# Altium footprint library 2020-05-10_07-53-45.PcbLib: 1 footprints
Each footprint in its own frame and in the unit in brackets; x right, y up, seen from the top. Pads: shape width x height; smd on the part's side, far side on the other; paste and mask are expansions set on the pad; w line width, h text height; cw(c..) or ccw(c..) is an arc to the next point about the centre after c.
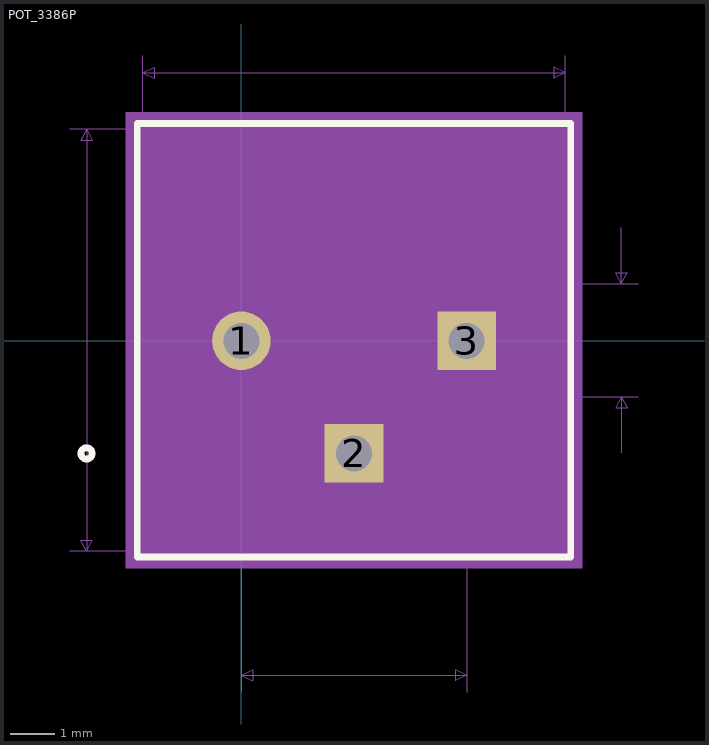
[diagram p0: the footprint, top view; thin cyan lines are the x and y axes]

## POT_3386P [mil]
pads (3):
  round 52 hole 32 mask+0: 1(0,0)
  rect 52x52 hole 32 mask+0: 2(100,-100) 3(200,0)
Top Overlay:
  circle w6: c-137.5,-100 r5
  lines w6: -92.5,-192 292.5,-192 292.5,193 -92.5,193 -92.5,-192
Mechanical 5:
  region: -102.5,203 302.5,203 302.5,-202 -102.5,-202
Mechanical 7:
  lines w1: -152.5,-187 100,-187 ; -152.5,188 100,188 ; -87.5,0.5 -87.5,253 ; 0,-312 0,0.5 ; 110,50.5 352.5,50.5 ; 200,-312 200,0.5 ; 200,-49.5 352.5,-49.5 ; 287.5,0.5 287.5,253 ; 337.5,-99.5 337.5,-49.5 ; 337.5,100.5 337.5,50.5 ; -137.5,-187 -137.5,188 ; -137.5,-187 -142.5,-177 -132.5,-177 -137.5,-187 ; -137.5,188 -142.5,178 -132.5,178 -137.5,188 ; -87.5,238 287.5,238 ; -87.5,238 -77.5,243 -77.5,233 -87.5,238 ; 0,-297 200,-297 ; 0,-297 10,-292 10,-302 0,-297 ; 200,-297 190,-292 190,-302 200,-297 ; 287.5,238 277.5,243 277.5,233 287.5,238 ; 337.5,-49.5 332.5,-59.5 342.5,-59.5 337.5,-49.5 ; 337.5,50.5 332.5,60.5 342.5,60.5 337.5,50.5
  text "Pinout: 1, 2, 3" at -87.5,-597 h50
  text "Default Padstyle: SX52Y52D32P" at -262.5,-657 h50
  text "Pin 1 Padstyle: EX52Y52D32P" at -237.5,-717 h50
  text "Alt 1 Padstyle: OX60Y90D30P" at -237.5,-777 h50
  text "Alt 2 Padstyle: OX90Y60D30P" at -237.5,-837 h50
  text "0.375in/9.525mm" at 6.25,258 h25
  text "0.1in/2.54mm" at 357.5,-12 h25
  text "0.2in/5.08mm" at 25,-342 h25
  text "0.375in/9.525mm" at -345,-12 h25
Mechanical 13:
  circle w0: c-67.5,-100 r5
  lines w1: -87.5,-187 287.5,-187 287.5,188 -87.5,188 -87.5,-187
Mechanical 15:
  region: 297.5,-197 -97.5,-197 -97.5,198 297.5,198
  lines w6: -97.5,-197 -97.5,198 297.5,198 297.5,-197 -97.5,-197
3D body: height 10, standoff 0, extent 0,0 10,10